# Altium footprint library WR-TBL_Pluggable Connector_5.08mm.PcbLib: 295 footprints (part 12 of 19)
Each footprint in its own frame and in the unit in brackets; x right, y up, seen from the top. Pads: shape width x height; smd on the part's side, far side on the other; paste and mask are expansions set on the pad; w line width, h text height; cw(c..) or ccw(c..) is an arc to the next point about the centre after c.
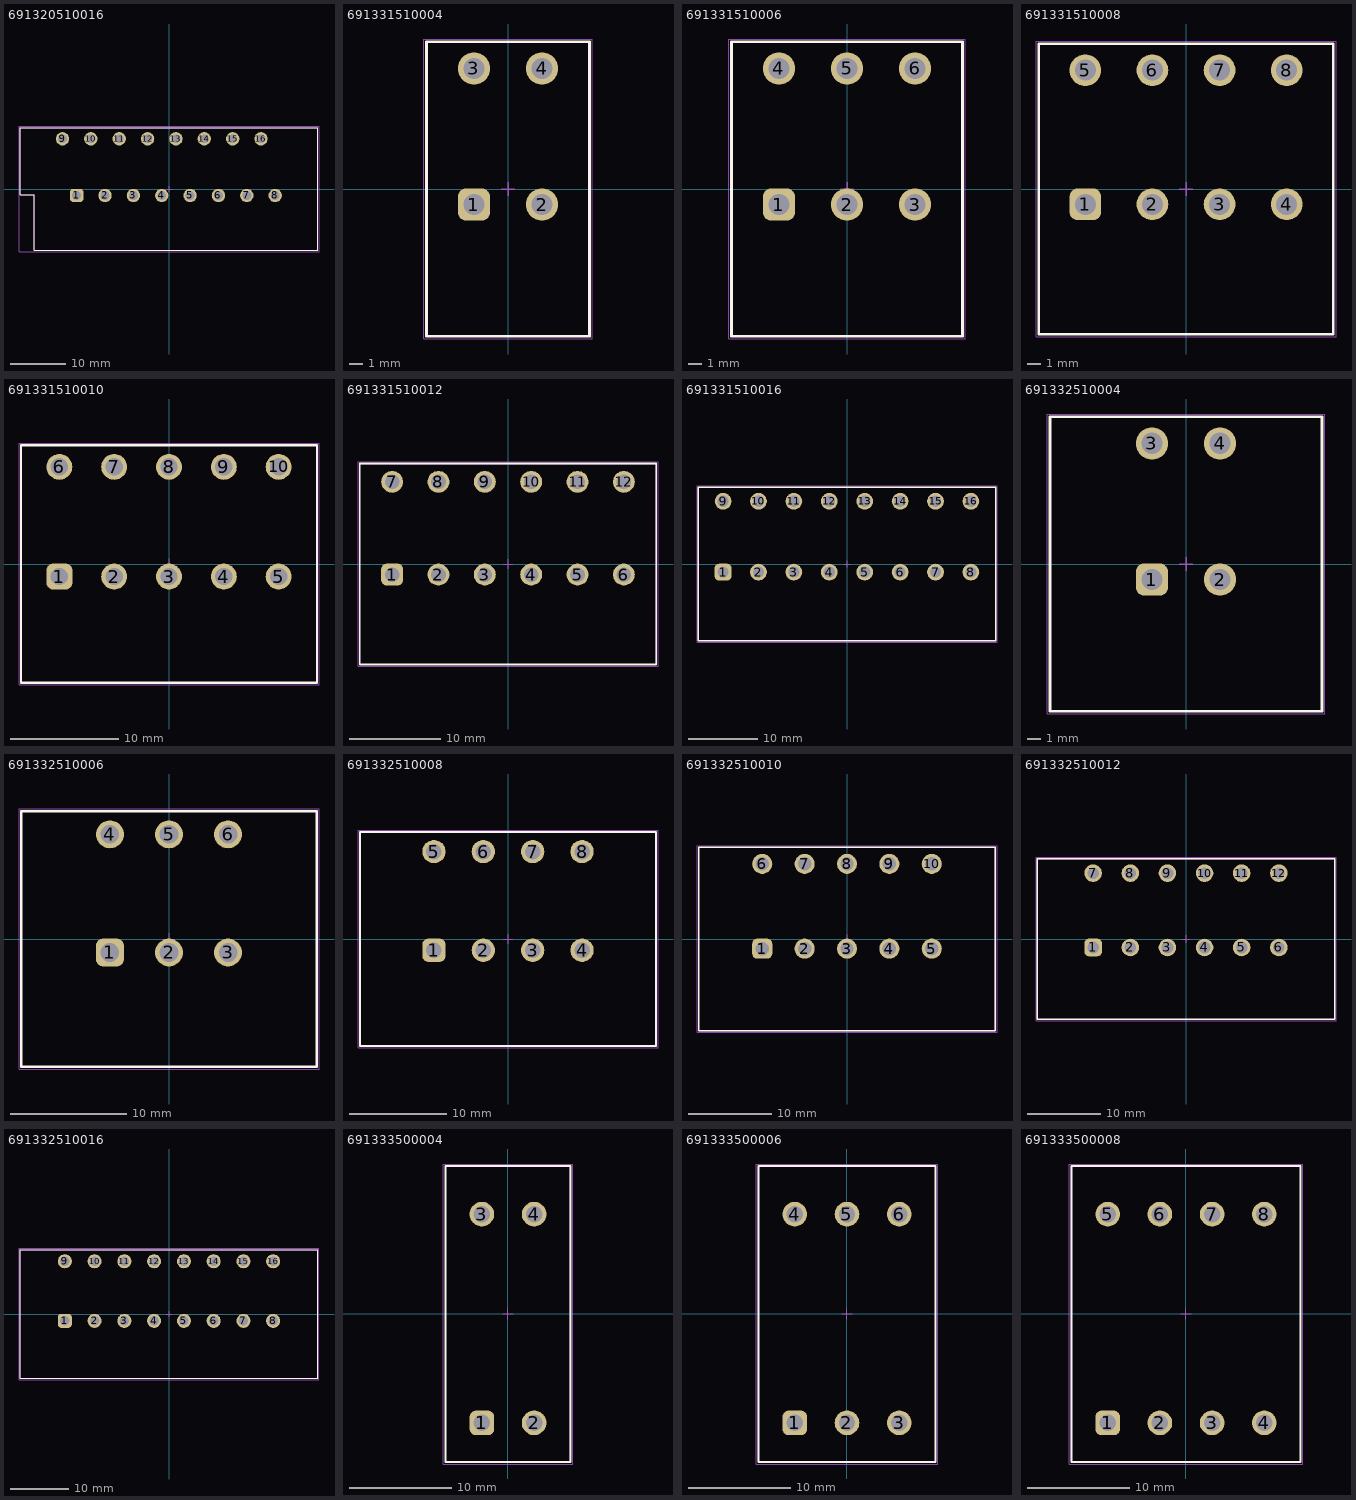
[diagram p11: the footprints below, top view; thin cyan lines are the x and y axes]

## 691320510016 [mm] "Double Level Horizontal Male PCB Header with closed Flanges & Nut Type, pitch 5.08mm, 16p"
height 23.7
pads (16):
  rrect50% 2.4x2.4 hole 1.6: 1(-16.54,-1.16)
  round 2.4 hole 1.6: 2(-11.46,-1.16) 3(-6.38,-1.16) 4(-1.3,-1.16) 5(3.78,-1.16) 6(8.86,-1.16) 7(13.94,-1.16) 8(19.02,-1.16) 9(-19.08,9) 10(-14,9) 11(-8.92,9) 12(-3.84,9) 13(1.24,9) 14(6.32,9) 15(11.4,9) 16(16.48,9)
Top Overlay:
  lines w0.2: -26.68,-1 -24.14,-1 -24.14,-11 26.68,-11 26.68,11 -26.68,11 -26.68,-1
Top Assembly:
  lines w0.1: -26.68,-1 -26.68,11 26.68,11 26.68,-11 -24.14,-11 -24.14,-1 -26.68,-1
Top Designator:
  text ".Designator" at -3.647,-0.357 h1
Top 3D Body:
  lines w0.1: -26.68,-1 -24.14,-1 -24.14,-11 26.68,-11 26.68,11 -26.68,11 -26.68,-1
Top Courtyard:
  lines w0.05: -26.88,-11.2 26.88,-11.2 26.88,11.2 -26.88,11.2 -26.88,-11.2
Top Component Center:
  lines w0.1: -0.5,0 0.5,0 ; 0,-0.5 0,0.5
3D body "691320510016.stp": height 23.74, standoff -3.96, extent -26.67,-11 26.67,11

## 691331510004 [mm] "5,08mm - PCB - Dual row - Horizontal - 04p"
height 28.8
pads (4):
  rrect50% 2.4x2.4 hole 1.6: 1(-2.54,-1.16)
  round 2.4 hole 1.6: 2(2.54,-1.16) 3(-2.54,9) 4(2.54,9)
Top Overlay:
  lines w0.2: -6.08,-11 6.08,-11 6.08,11 -6.08,11 -6.08,-11
Top Assembly:
  lines w0.1: -6.08,-11 -6.08,11 6.08,11 6.08,-11 -6.08,-11
Top Designator:
  text ".Designator" at -3.647,-0.357 h1
Top 3D Body:
  lines w0.1: -6.08,-11 6.08,-11 6.08,11 -6.08,11 -6.08,-11
Top Courtyard:
  lines w0.05: -6.28,-11.2 -6.28,11.2 6.28,11.2 6.28,-11.2 -6.28,-11.2
Top Component Center:
  lines w0.1: -0.5,0 0.5,0 ; 0,-0.5 0,0.5
3D body "691331510004.stp": height 28.85, standoff -3.95, extent -6.08,-11 6.08,11

## 691331510006 [mm] "5,08mm - PCB - Dual row - Horizontal - 06p"
height 28.8
pads (6):
  rrect50% 2.4x2.4 hole 1.6: 1(-5.08,-1.16)
  round 2.4 hole 1.6: 2(0,-1.16) 3(5.08,-1.16) 4(-5.08,9) 5(0,9) 6(5.08,9)
Top Overlay:
  lines w0.2: -8.62,-11 8.62,-11 8.62,11 -8.62,11 -8.62,-11
Top Assembly:
  lines w0.1: -8.62,-11 -8.62,11 8.62,11 8.62,-11 -8.62,-11
Top Designator:
  text ".Designator" at -3.647,-0.357 h1
Top 3D Body:
  lines w0.1: -8.62,-11 8.62,-11 8.62,11 -8.62,11 -8.62,-11
Top Courtyard:
  lines w0.05: -8.82,-11.2 -8.82,11.2 8.82,11.2 8.82,-11.2 -8.82,-11.2
Top Component Center:
  lines w0.1: -0.5,0 0.5,0 ; 0,-0.5 0,0.5
3D body "691331510006.stp": height 28.85, standoff -3.95, extent -8.62,-11 8.62,11

## 691331510008 [mm] "5,08mm - PCB - Dual row - Horizontal - 08p"
height 28.8
pads (8):
  rrect50% 2.4x2.4 hole 1.6: 1(-7.62,-1.16)
  round 2.4 hole 1.6: 2(-2.54,-1.16) 3(2.54,-1.16) 4(7.62,-1.16) 5(-7.62,9) 6(-2.54,9) 7(2.54,9) 8(7.62,9)
Top Overlay:
  lines w0.2: -11.16,-11 -11.16,11 11.16,11 11.16,-11 -11.16,-11
Top Assembly:
  lines w0.1: -11.16,-11 11.16,-11 11.16,11 -11.16,11 -11.16,-11
Top Designator:
  text ".Designator" at -3.647,-0.357 h1
Top 3D Body:
  lines w0.1: -11.16,-11 -11.16,11 11.16,11 11.16,-11 -11.16,-11
Top Courtyard:
  lines w0.05: -11.36,-11.2 11.36,-11.2 11.36,11.2 -11.36,11.2 -11.36,-11.2
Top Component Center:
  lines w0.1: -0.5,0 0.5,0 ; 0,-0.5 0,0.5
3D body "691331510008.stp": height 28.85, standoff -3.95, extent -11.16,-11 11.16,11

## 691331510010 [mm] "5,08mm - PCB - Dual row - Horizontal - 10p"
height 28.8
pads (10):
  rrect50% 2.4x2.4 hole 1.6: 1(-10.16,-1.16)
  round 2.4 hole 1.6: 2(-5.08,-1.16) 3(0,-1.16) 4(5.08,-1.16) 5(10.16,-1.16) 6(-10.16,9) 7(-5.08,9) 8(0,9) 9(5.08,9) 10(10.16,9)
Top Overlay:
  lines w0.2: -13.7,-11 13.7,-11 13.7,11 -13.7,11 -13.7,-11
Top Assembly:
  lines w0.1: -13.7,-11 -13.7,11 13.7,11 13.7,-11 -13.7,-11
Top Designator:
  text ".Designator" at -3.647,-0.357 h1
Top 3D Body:
  lines w0.1: -13.7,-11 13.7,-11 13.7,11 -13.7,11 -13.7,-11
Top Courtyard:
  lines w0.05: -13.9,-11.2 -13.9,11.2 13.9,11.2 13.9,-11.2 -13.9,-11.2
Top Component Center:
  lines w0.1: -0.5,0 0.5,0 ; 0,-0.5 0,0.5
3D body "691331510010.stp": height 28.85, standoff -3.95, extent -13.7,-11 13.7,11

## 691331510012 [mm] "5,08mm - PCB - Dual row - Horizontal - 12p"
height 28.8
pads (12):
  rrect50% 2.4x2.4 hole 1.6: 1(-12.7,-1.16)
  round 2.4 hole 1.6: 2(-7.62,-1.16) 3(-2.54,-1.16) 4(2.54,-1.16) 5(7.62,-1.16) 6(12.7,-1.16) 7(-12.7,9) 8(-7.62,9) 9(-2.54,9) 10(2.54,9) 11(7.62,9) 12(12.7,9)
Top Overlay:
  lines w0.2: -16.24,-11 16.24,-11 16.24,11 -16.24,11 -16.24,-11
Top Assembly:
  lines w0.1: -16.24,-11 -16.24,11 16.24,11 16.24,-11 -16.24,-11
Top Designator:
  text ".Designator" at -3.647,-0.357 h1
Top 3D Body:
  lines w0.1: -16.24,-11 16.24,-11 16.24,11 -16.24,11 -16.24,-11
Top Courtyard:
  lines w0.05: -16.44,-11.2 -16.44,11.2 16.44,11.2 16.44,-11.2 -16.44,-11.2
Top Component Center:
  lines w0.1: -0.5,0 0.5,0 ; 0,-0.5 0,0.5
3D body "691331510012.stp": height 28.85, standoff -3.95, extent -16.24,-11 16.24,11

## 691331510016 [mm] "5,08mm - PCB - Dual row - Horizontal - 16p"
height 28.8
pads (16):
  rrect50% 2.4x2.4 hole 1.6: 1(-17.78,-1.16)
  round 2.4 hole 1.6: 2(-12.7,-1.16) 3(-7.62,-1.16) 4(-2.54,-1.16) 5(2.54,-1.16) 6(7.62,-1.16) 7(12.7,-1.16) 8(17.78,-1.16) 9(-17.78,9) 10(-12.7,9) 11(-7.62,9) 12(-2.54,9) 13(2.54,9) 14(7.62,9) 15(12.7,9) 16(17.78,9)
Top Overlay:
  lines w0.2: -21.32,-11 -21.32,11 21.32,11 21.32,-11 -21.32,-11
Top Assembly:
  lines w0.1: -21.32,-11 21.32,-11 21.32,11 -21.32,11 -21.32,-11
Top Designator:
  text ".Designator" at -3.647,-0.357 h1
Top 3D Body:
  lines w0.1: -21.32,-11 -21.32,11 21.32,11 21.32,-11 -21.32,-11
Top Courtyard:
  lines w0.05: -21.52,-11.2 21.52,-11.2 21.52,11.2 -21.52,11.2 -21.52,-11.2
Top Component Center:
  lines w0.1: -0.5,0 0.5,0 ; 0,-0.5 0,0.5
3D body "691331510016.stp": height 28.85, standoff -3.95, extent -21.32,-11 21.32,11

## 691332510004 [mm] "5,08mm - PCB - Dual row - Horizontal - Flanges - 04p"
height 28.8
pads (4):
  rrect50% 2.4x2.4 hole 1.6: 1(-2.54,-1.16)
  round 2.4 hole 1.6: 2(2.54,-1.16) 3(-2.54,9) 4(2.54,9)
Top Overlay:
  lines w0.2: -10.16,-11 10.16,-11 10.16,11 -10.16,11 -10.16,-11
Top Assembly:
  lines w0.1: -10.16,-11 -10.16,11 10.16,11 10.16,-11 -10.16,-11
Top Designator:
  text ".Designator" at -3.647,-0.357 h1
Top 3D Body:
  lines w0.1: -10.16,-11 10.16,-11 10.16,11 -10.16,11 -10.16,-11
Top Courtyard:
  lines w0.05: -10.36,-11.2 10.36,-11.2 10.36,11.2 -10.36,11.2 -10.36,-11.2
Top Component Center:
  lines w0.1: -0.5,0 0.5,0 ; 0,-0.5 0,0.5
3D body "691332510004.stp": height 28.85, standoff -3.95, extent -10.16,-11 10.16,11

## 691332510006 [mm] "5,08mm - PCB - Dual row - Horizontal - Flanges - 06p"
height 28.8
pads (6):
  rrect50% 2.4x2.4 hole 1.6: 1(-5.08,-1.16)
  round 2.4 hole 1.6: 2(0,-1.16) 3(5.08,-1.16) 4(-5.08,9) 5(0,9) 6(5.08,9)
Top Overlay:
  lines w0.2: -12.7,-11 -12.7,11 12.7,11 12.7,-11 -12.7,-11
Top Assembly:
  lines w0.1: -12.7,-11 12.7,-11 12.7,11 -12.7,11 -12.7,-11
Top Designator:
  text ".Designator" at -3.647,-0.357 h1
Top 3D Body:
  lines w0.1: -12.7,-11 -12.7,11 12.7,11 12.7,-11 -12.7,-11
Top Courtyard:
  lines w0.05: -12.9,-11.2 -12.9,11.2 12.9,11.2 12.9,-11.2 -12.9,-11.2
Top Component Center:
  lines w0.1: -0.5,0 0.5,0 ; 0,-0.5 0,0.5
3D body "691332510006.stp": height 28.85, standoff -3.95, extent -12.7,-11 12.7,11

## 691332510008 [mm] "5,08mm - PCB - Dual row - Horizontal - Flanges - 08p"
height 28.8
pads (8):
  rrect50% 2.4x2.4 hole 1.6: 1(-7.62,-1.16)
  round 2.4 hole 1.6: 2(-2.54,-1.16) 3(2.54,-1.16) 4(7.62,-1.16) 5(-7.62,9) 6(-2.54,9) 7(2.54,9) 8(7.62,9)
Top Overlay:
  lines w0.2: -15.24,-11 15.24,-11 15.24,11 -15.24,11 -15.24,-11
Top Assembly:
  lines w0.1: -15.24,-11 -15.24,11 15.24,11 15.24,-11 -15.24,-11
Top Designator:
  text ".Designator" at -3.647,-0.357 h1
Top 3D Body:
  lines w0.1: -15.24,-11 15.24,-11 15.24,11 -15.24,11 -15.24,-11
Top Courtyard:
  lines w0.05: -15.44,-11.2 15.44,-11.2 15.44,11.2 -15.44,11.2 -15.44,-11.2
Top Component Center:
  lines w0.1: -0.5,0 0.5,0 ; 0,-0.5 0,0.5
3D body "691332510008.stp": height 28.85, standoff -3.95, extent -15.24,-11 15.24,11

## 691332510010 [mm] "5,08mm - PCB - Dual row - Horizontal - Flanges - 10p"
height 28.8
pads (10):
  rrect50% 2.4x2.4 hole 1.6: 1(-10.16,-1.16)
  round 2.4 hole 1.6: 2(-5.08,-1.16) 3(0,-1.16) 4(5.08,-1.16) 5(10.16,-1.16) 6(-10.16,9) 7(-5.08,9) 8(0,9) 9(5.08,9) 10(10.16,9)
Top Overlay:
  lines w0.2: -17.78,-11 17.78,-11 17.78,11 -17.78,11 -17.78,-11
Top Assembly:
  lines w0.1: -17.78,-11 -17.78,11 17.78,11 17.78,-11 -17.78,-11
Top Designator:
  text ".Designator" at -3.647,-0.357 h1
Top 3D Body:
  lines w0.1: -17.78,-11 17.78,-11 17.78,11 -17.78,11 -17.78,-11
Top Courtyard:
  lines w0.05: -17.98,-11.2 17.98,-11.2 17.98,11.2 -17.98,11.2 -17.98,-11.2
Top Component Center:
  lines w0.1: -0.5,0 0.5,0 ; 0,-0.5 0,0.5
3D body "691332510010.stp": height 28.85, standoff -3.95, extent -17.78,-11 17.78,11

## 691332510012 [mm] "5,08mm - PCB - Dual row - Horizontal - Flanges - 12p"
height 28.8
pads (12):
  rrect50% 2.4x2.4 hole 1.6: 1(-12.7,-1.16)
  round 2.4 hole 1.6: 2(-7.62,-1.16) 3(-2.54,-1.16) 4(2.54,-1.16) 5(7.62,-1.16) 6(12.7,-1.16) 7(-12.7,9) 8(-7.62,9) 9(-2.54,9) 10(2.54,9) 11(7.62,9) 12(12.7,9)
Top Overlay:
  lines w0.2: -20.32,-11 -20.32,11 20.32,11 20.32,-11 -20.32,-11
Top Assembly:
  lines w0.1: -20.32,-11 20.32,-11 20.32,11 -20.32,11 -20.32,-11
Top Designator:
  text ".Designator" at -3.647,-0.357 h1
Top 3D Body:
  lines w0.1: -20.32,-11 -20.32,11 20.32,11 20.32,-11 -20.32,-11
Top Courtyard:
  lines w0.05: -20.52,-11.2 -20.52,11.2 20.52,11.2 20.52,-11.2 -20.52,-11.2
Top Component Center:
  lines w0.1: -0.5,0 0.5,0 ; 0,-0.5 0,0.5
3D body "691332510012.stp": height 28.85, standoff -3.95, extent -20.32,-11 20.32,11

## 691332510016 [mm] "5,08mm - PCB - Dual row - Horizontal - Flanges - 16p"
height 28.8
pads (16):
  rrect50% 2.4x2.4 hole 1.6: 1(-17.78,-1.16)
  round 2.4 hole 1.6: 2(-12.7,-1.16) 3(-7.62,-1.16) 4(-2.54,-1.16) 5(2.54,-1.16) 6(7.62,-1.16) 7(12.7,-1.16) 8(17.78,-1.16) 9(-17.78,9) 10(-12.7,9) 11(-7.62,9) 12(-2.54,9) 13(2.54,9) 14(7.62,9) 15(12.7,9) 16(17.78,9)
Top Overlay:
  lines w0.2: -25.4,-11 -25.4,11 25.4,11 25.4,-11 -25.4,-11
Top Assembly:
  lines w0.1: -25.4,-11 25.4,-11 25.4,11 -25.4,11 -25.4,-11
Top Designator:
  text ".Designator" at -3.647,-0.357 h1
Top 3D Body:
  lines w0.1: -25.4,-11 -25.4,11 25.4,11 25.4,-11 -25.4,-11
Top Courtyard:
  lines w0.05: -25.6,-11.2 -25.6,11.2 25.6,11.2 25.6,-11.2 -25.6,-11.2
Top Component Center:
  lines w0.1: -0.5,0 0.5,0 ; 0,-0.5 0,0.5
3D body "691332510016.stp": height 28.85, standoff -3.95, extent -25.4,-11 25.4,11

## 691333500004 [mm] "5,08mm - PCB - Dual row - Vertical - 04p"
height 22
pads (4):
  rrect50% 2.4x2.4 hole 1.6: 1(-2.54,-10.6)
  round 2.4 hole 1.6: 2(2.54,-10.6) 3(-2.54,9.72) 4(2.54,9.72)
Top Overlay:
  lines w0.2: -6.08,-14.4 6.08,-14.4 6.08,14.4 -6.08,14.4 -6.08,-14.4
Top Assembly:
  lines w0.1: -6.08,-14.4 -6.08,14.4 6.08,14.4 6.08,-14.4 -6.08,-14.4
Top Designator:
  text ".Designator" at -3.647,-0.357 h1
Top 3D Body:
  lines w0.1: -6.08,-14.4 6.08,-14.4 6.08,14.4 -6.08,14.4 -6.08,-14.4
Top Courtyard:
  lines w0.05: -6.28,-14.6 -6.28,14.6 6.28,14.6 6.28,-14.6 -6.28,-14.6
Top Component Center:
  lines w0.1: -0.5,0 0.5,0 ; 0,-0.5 0,0.5
3D body "691333500004.stp": height 22.05, standoff -3.85, extent -6.08,-14.4 6.08,14.4

## 691333500006 [mm] "5,08mm - PCB - Dual row - Vertical - 06p"
height 22
pads (6):
  rrect50% 2.4x2.4 hole 1.6: 1(-5.08,-10.6)
  round 2.4 hole 1.6: 2(0,-10.6) 3(5.08,-10.6) 4(-5.08,9.72) 5(0,9.72) 6(5.08,9.72)
Top Overlay:
  lines w0.2: -8.62,-14.4 -8.62,14.4 8.62,14.4 8.62,-14.4 -8.62,-14.4
Top Assembly:
  lines w0.1: -8.62,-14.4 8.62,-14.4 8.62,14.4 -8.62,14.4 -8.62,-14.4
Top Designator:
  text ".Designator" at -3.647,-0.357 h1
Top 3D Body:
  lines w0.1: -8.62,-14.4 -8.62,14.4 8.62,14.4 8.62,-14.4 -8.62,-14.4
Top Courtyard:
  lines w0.05: -8.82,-14.6 8.82,-14.6 8.82,14.6 -8.82,14.6 -8.82,-14.6
Top Component Center:
  lines w0.1: -0.5,0 0.5,0 ; 0,-0.5 0,0.5
3D body "691333500006.stp": height 22.05, standoff -3.85, extent -8.62,-14.4 8.62,14.4

## 691333500008 [mm] "5,08mm - PCB - Dual row - Vertical - 08p"
height 22
pads (8):
  rrect50% 2.4x2.4 hole 1.6: 1(-7.62,-10.6)
  round 2.4 hole 1.6: 2(-2.54,-10.6) 3(2.54,-10.6) 4(7.62,-10.6) 5(-7.62,9.72) 6(-2.54,9.72) 7(2.54,9.72) 8(7.62,9.72)
Top Overlay:
  lines w0.2: -11.16,-14.4 -11.16,14.4 11.16,14.4 11.16,-14.4 -11.16,-14.4
Top Assembly:
  lines w0.1: -11.16,-14.4 11.16,-14.4 11.16,14.4 -11.16,14.4 -11.16,-14.4
Top Designator:
  text ".Designator" at -3.647,-0.357 h1
Top 3D Body:
  lines w0.1: -11.16,-14.4 -11.16,14.4 11.16,14.4 11.16,-14.4 -11.16,-14.4
Top Courtyard:
  lines w0.05: -11.36,-14.6 11.36,-14.6 11.36,14.6 -11.36,14.6 -11.36,-14.6
Top Component Center:
  lines w0.1: -0.5,0 0.5,0 ; 0,-0.5 0,0.5
3D body "691333500008.stp": height 22.05, standoff -3.85, extent -11.16,-14.4 11.16,14.4